# Altium footprint library Footprint-Lib-PhilsLab.PcbLib: 544 footprints (part 8 of 34)
Each footprint in its own frame and in the unit in brackets; x right, y up, seen from the top. Pads: shape width x height; smd on the part's side, far side on the other; paste and mask are expansions set on the pad; w line width, h text height; cw(c..) or ccw(c..) is an arc to the next point about the centre after c.
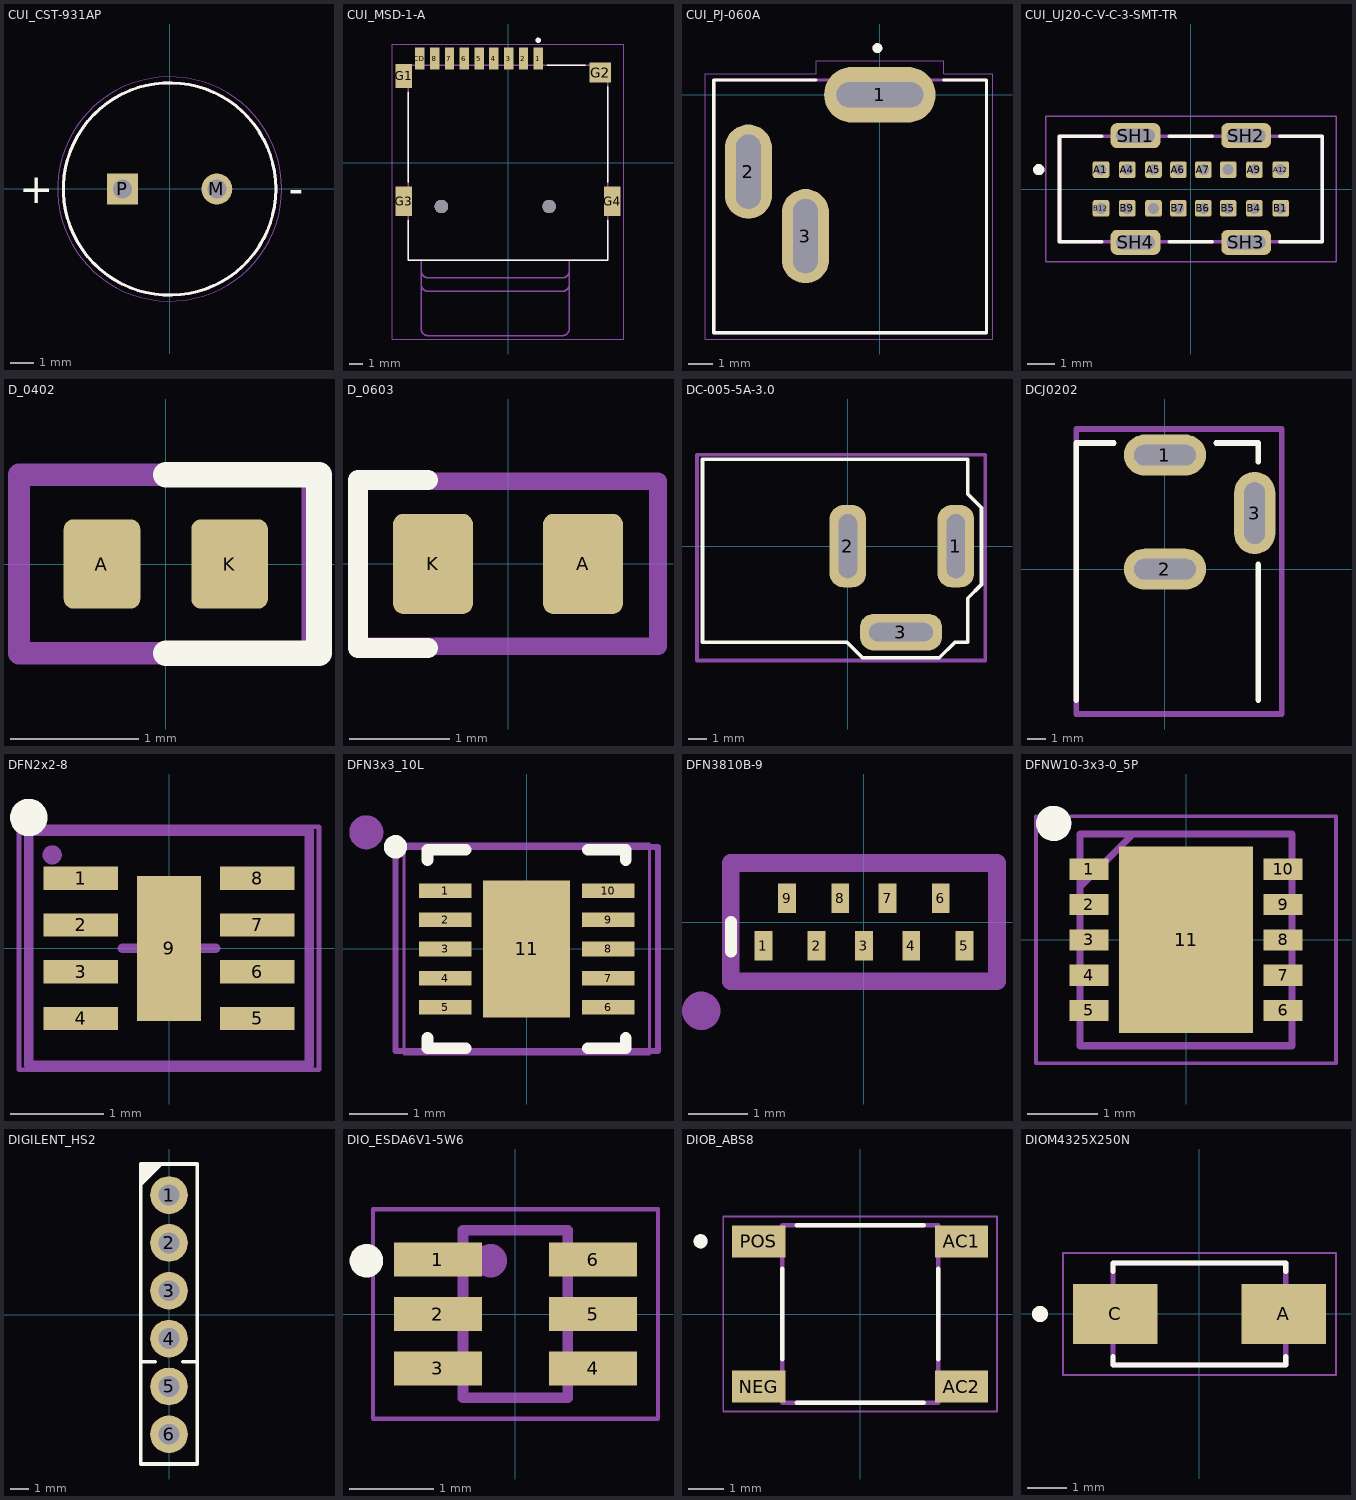
[diagram p7: the footprints below, top view; thin cyan lines are the x and y axes]

## CUI_CST-931AP [mm]
pads (2):
  round 1.308 hole 0.8: M(2,0)
  rect 1.308x1.308 hole 0.8: P(-2,0)
Top Overlay:
  circle w0.127: c0,0 r4.5
  text "+" at -6.381,-0.601 h1.27
  text "-" at 5.054,-0.601 h1.27
Mechanical 13:
  circle w0.127: c0,0 r4.5
Mechanical 15:
  circle w0.05: c0,0 r4.75
3D body "CUI_DEVICES_CMI-1295-0585T.step": height 9, standoff -6, extent -6.275,-5.85 5.725,6.15

## CUI_MSD-1-A [mm]
height 2
pads (15):
  rect 0.7x1.6 smd: 1(2.25,7.75) 2(1.15,7.75) 3(0.05,7.75) 4(-1.05,7.75) 5(-2.15,7.75) 6(-3.25,7.75) 7(-4.35,7.75) 8(-5.45,7.75) CD(-6.55,7.75)
  rect 1.2x1.8 smd: G1(-7.75,6.45)
  rect 1.6x1.5 smd: G2(6.85,6.7)
  rect 1.2x2.2 smd: G3(-7.75,-2.85) G4(7.75,-2.85)
  round 1 hole 1 unplated: ""(-4.95,-3.25) ""(3.05,-3.25)
Top Overlay:
  circle w0.2: c2.25,9.1 r0.1
  lines w0.127: -7.425,-4.27 -7.425,-7.25 7.425,-7.25 7.425,-4.27 ; -7.425,-1.43 -7.425,5.23 ; 2.92,7.25 5.73,7.25 ; 7.425,-1.43 7.425,5.63
Mechanical 13:
  circle w0.2: c2.25,9.1 r0.1
  lines w0.127: -6.45,-9.05 ccw(c-5.95,-9.05) -5.95,-9.55 4.05,-9.55 ccw(c4.05,-9.05) 4.55,-9.05 ; -6.45,-8.05 ccw(c-5.95,-8.05) -5.95,-8.55 4.05,-8.55 ccw(c4.05,-8.05) 4.55,-8.05 ; -6.45,-7.25 -6.45,-12.35 ccw(c-5.95,-12.35) -5.95,-12.85 4.05,-12.85 ccw(c4.05,-12.35) 4.55,-12.35 4.55,-7.25 ; -6.45,-7.25 4.55,-7.25 ; -6.45,-7.25 -7.425,-7.25 -7.425,7.25 7.425,7.25 7.425,-7.25 4.55,-7.25
Mechanical 15:
  lines w0.05: -8.6,-13.1 -8.6,8.8 8.6,8.8 8.6,-13.1 -8.6,-13.1
3D body "step_temp.STEP": height 1.8, standoff -0.6, extent -8.165,-7.24 7.985,7.81

## CUI_PJ-060A [mm]
height 14
pads (3):
  oval 4.5x2.25 hole 1 slot 3.5 at 0 deg: 1(0,0)
  oval 1.9x3.8 hole 1 slot 3 at 90 deg: 2(-5.3,-3.1) 3(-3,-5.7)
Top Overlay:
  circle w0.2: c-0.1,1.88 r0.1
  lines w0.127: -2.57,0.6 -6.7,0.6 -6.7,-9.6 4.3,-9.6 4.3,0.6 2.57,0.6
Mechanical 13:
  circle w0.2: c-0.1,1.88 r0.1
  lines w0.127: -6.7,-9.6 -6.7,0.6 4.3,0.6 4.3,-9.6 -6.7,-9.6
Mechanical 15:
  lines w0.05: -7.05,-9.85 -7.05,0.85 -2.57,0.85 -2.57,1.375 2.57,1.375 2.57,0.85 4.55,0.85 4.55,-9.85 -7.05,-9.85
3D body "step_temp.STEP": height 14.07, standoff -3.92, extent -6.643,-9.398 4.357,0.802

## CUI_UJ20-C-V-C-3-SMT-TR [mm]
height 10.75
pads (20):
  rrect25% 0.6x0.6 hole 0.4 square: A1(-3.25,0.7) A4(-2.3,0.7) A5(-1.35,0.7) A6(-0.45,0.7) A7(0.45,0.7) A9(2.3,0.7) A12(3.25,0.7) B1(3.25,-0.7) B4(2.3,-0.7) B5(1.35,-0.7) B6(0.45,-0.7) B7(-0.45,-0.7) B9(-2.3,-0.7) B12(-3.25,-0.7) MH33(1.35,0.7) MH42(-1.35,-0.7)
  rrect50% 1.8x0.9 hole 0.5 slot 1.4 at 0 deg: SH1(-2,1.93) SH2(2,1.93) SH3(2,-1.93) SH4(-2,-1.93)
Top Overlay:
  circle w0.2: c-5.5,0.7 r0.1
  lines w0.127: -3.22,-1.9 -4.75,-1.9 -4.75,1.9 -3.22,1.9 ; -0.78,-1.9 0.78,-1.9 ; -0.78,1.9 0.78,1.9 ; 3.22,-1.9 4.75,-1.9 4.75,1.9 3.22,1.9
Keep-Out Layer:
  board cut-out: -2.7,1.727 -2.7,1.73 -2.7,2.13 -2.7,2.133 -2.7,2.135 -2.699,2.138 -2.699,2.14 -2.698,2.143 -2.698,2.145 -2.697,2.148 -2.696,2.15 -2.695,2.153 -2.693,2.155 -2.692,2.157 -2.69,2.159 -2.689,2.161 -2.687,2.163 -2.685,2.165 -2.683,2.167 -2.681,2.169 -2.679,2.17 -2.677,2.172 -2.675,2.173 -2.673,2.175 -2.67,2.176 -2.668,2.177 -2.665,2.178 -2.663,2.178 -2.66,2.179 -2.658,2.179 -2.655,2.18 -2.653,2.18 -2.65,2.18 -1.35,2.18 -1.347,2.18 -1.345,2.18 -1.342,2.179 -1.34,2.179 -1.337,2.178 -1.335,2.178 -1.332,2.177 -1.33,2.176 -1.327,2.175 -1.325,2.173 -1.323,2.172 -1.321,2.17 -1.319,2.169 -1.317,2.167 -1.315,2.165 -1.313,2.163 -1.311,2.161 -1.31,2.159 -1.308,2.157 -1.307,2.155 -1.305,2.153 -1.304,2.15 -1.303,2.148 -1.302,2.145 -1.302,2.143 -1.301,2.14 -1.301,2.138 -1.3,2.135 -1.3,2.133 -1.3,2.13 -1.3,1.73 -1.3,1.727 -1.3,1.725 -1.301,1.722 -1.301,1.72 -1.302,1.717 -1.302,1.715 -1.303,1.712 -1.304,1.71 -1.305,1.707 -1.307,1.705 -1.308,1.703 -1.31,1.701 -1.311,1.699 -1.313,1.697 -1.315,1.695 -1.317,1.693 -1.319,1.691 -1.321,1.69 -1.323,1.688 -1.325,1.687 -1.327,1.685 -1.33,1.684 -1.332,1.683 -1.335,1.682 -1.337,1.682 -1.34,1.681 -1.342,1.681 -1.345,1.68 -1.347,1.68 -1.35,1.68 -2.65,1.68 -2.653,1.68 -2.655,1.68 -2.658,1.681 -2.66,1.681 -2.663,1.682 -2.665,1.682 -2.668,1.683 -2.67,1.684 -2.673,1.685 -2.675,1.687 -2.677,1.688 -2.679,1.69 -2.681,1.691 -2.683,1.693 -2.685,1.695 -2.687,1.697 -2.689,1.699 -2.69,1.701 -2.692,1.703 -2.693,1.705 -2.695,1.707 -2.696,1.71 -2.697,1.712 -2.698,1.715 -2.698,1.717 -2.699,1.72 -2.699,1.722 -2.7,1.725
Mechanical 13:
  circle w0.2: c-5.5,0.7 r0.1
  lines w0.127: -4.75,-1.9 4.75,-1.9 4.75,1.9 -4.75,1.9 -4.75,-1.9
Mechanical 15:
  lines w0.05: -5.25,-2.63 5.25,-2.63 5.25,2.63 -5.25,2.63 -5.25,-2.63
3D body "step_temp.STEP": height 10.5, standoff -2, extent -4.75,-2.08 4.75,2.08

## D_0402 [mm]
pads (2):
  rrect25% 0.6x0.7 smd: A(-0.5,0) K(0.5,0)
Top Overlay:
  lines w0.2: 0,-0.7 1.2,-0.7 1.2,0.7 0,0.7
Mechanical 13:
  lines w0.175: -1.15,-0.7 1.15,-0.7 1.15,0.7 -1.15,0.7 -1.15,-0.7
  text "'.Designator'" at -5.665,-0.417 h1
3D body "D0402.stp": height 0.51, standoff 0.01, extent -0.5,-0.25 0.5,0.25

## D_0603 [mm]
pads (2):
  rrect25% 0.8x1 smd: A(0.75,0) K(-0.75,0)
Top Overlay:
  lines w0.2: -0.8,-0.843 -1.5,-0.843 -1.5,0 -1.5,0.841 -0.8,0.841
Mechanical 13:
  lines w0.175: -1.5,-0.825 1.5,-0.825 1.5,0.825 -1.5,0.825 -1.5,-0.825
  text "'.Designator'" at -5.665,-0.417 h1
3D body "D_TVS_0603.stp": height 0.81, standoff 0.01, extent -0.8,-0.45 0.8,0.45

## DC-005-5A-3.0 [mm]
pads (3):
  rrect75% 2x4.5 hole 1 slot 3.5 at 90 deg mask+0.07: 1(5.9,0) 2(0,0)
  rrect75% 4.5x2 hole 1 slot 3.5 at 0 deg mask+0.07: 3(2.9,-4.7)
Top Overlay:
  lines w0.2: -7.95,-5.25 -0.05,-5.25 0.8,-6.1 5,-6.1 5.85,-5.25 6.55,-5.25 6.55,-2.85 7.3,-2.1 7.3,2.1 6.55,2.85 6.55,4.75 -7.95,4.75 -7.95,-5.25
Mechanical 13:
  lines w0.2: -8.25,-6.25 -8.25,5 7.5,5 7.5,-6.25 -8.25,-6.25
  text "'.Designator'" at -7.231,-1.087 h1.25
3D body "dc-005-5a-3_0.stp": height 11.01, standoff -3.59, extent -7.7,-4.9 6.3,4.5

## DCJ0202 [mm]
pads (3):
  oval 4.4x2.2 hole 1.1 slot 3.3 at 0 deg: 1(0,6.1) 2(0,0)
  oval 2.2x4.4 hole 1.1 slot 3.3 at 90 deg: 3(4.8,3)
Top Overlay:
  lines w0.3: -4.75,-7 -4.75,6.75 -2.75,6.75 ; 2.75,6.75 5,6.75 5,5.75 ; 5,-7 5,0.25
Mechanical 13:
  lines w0.3: -4.75,-7.75 6.25,-7.75 6.25,7.5 -4.75,7.5 -4.75,-7.75
  text "'.Designator'" at -5.665,-0.417 h1
3D body "DCJ0202.step": height 11.01, standoff -3.49, extent -4.518,-7.481 4.837,6.519

## DFN2x2-8 [mm]
height 0.65
pads (9):
  rect 0.8x0.25 smd mask+0.15: 1(-0.945,0.75) 2(-0.945,0.25) 3(-0.945,-0.25) 4(-0.945,-0.75) 5(0.945,-0.75) 6(0.945,-0.25) 7(0.945,0.25) 8(0.945,0.75)
  rect 0.69x1.55 smd: 9(0,0)
Top Overlay:
  circle w0.2: c-1.5,1.4 r0.1
Mechanical 13:
  circle w0.1: c-1.25,1 r0.053
  lines w0.1: -1.5,-1.25 1.5,-1.25 1.5,1.25 -1.5,1.25 -1.5,-1.25
  text "'.Designator'" at -5.815,-0.9 h1
Mechanical 15:
  lines w0.05: -1.605,-1.3 1.605,-1.3 1.605,1.3 -1.605,1.3 -1.605,-1.3
  lines w0.1: -0.5,0 0.5,0 ; 0,-0.5 0,0.5
3D body "DFN2x2-8.step": height 0.65, standoff 0, extent -1.051,-1.05 1.051,1.05

## DFN3x3_10L [mm]
height 0.8
pads (11):
  rect 0.9x0.25 smd mask+0.15: 1(-1.395,1) 2(-1.395,0.5) 3(-1.395,0) 4(-1.395,-0.5) 5(-1.395,-1) 6(1.395,-1) 7(1.395,-0.5) 8(1.395,0) 9(1.395,0.5) 10(1.395,1)
  rect 1.49x2.35 smd: 11(0,0)
Top Overlay:
  circle w0.3: c-2.25,1.75 r0.05
  lines w0.2: -1.7,-1.525 -1.7,-1.7 -1.045,-1.7 ; -1.7,1.525 -1.7,1.7 -1.045,1.7 ; 1.045,-1.7 1.7,-1.7 1.7,-1.525 ; 1.045,1.7 1.7,1.7 1.7,1.525
Mechanical 13:
  circle w0.3: c-2.75,2 r0.141
  lines w0.1: -2.25,-1.75 -2.25,1.75 2.25,1.75 2.25,-1.75 -2.25,-1.75
  text "'.Designator'" at -5.665,-0.417 h1
Mechanical 15:
  lines w0.05: -2.105,-1.8 -2.105,1.8 2.105,1.8 2.105,-1.8 -2.105,-1.8
  lines w0.1: -0.5,0 0.5,0 ; 0,-0.5 0,0.5
3D body "DFN3x3_10L.step": height 0.8, standoff 0, extent -1.551,-1.55 1.551,1.55

## DFN3810B-9 [mm]
pads (9):
  rect 0.3x0.5 smd: 1(-1.7,-0.4) 2(-0.8,-0.4) 3(0,-0.4) 4(0.8,-0.4) 5(1.7,-0.4) 6(1.3,0.4) 7(0.4,0.4) 8(-0.4,0.4) 9(-1.3,0.4)
Top Overlay:
  lines w0.2: -2.25,-0.5 -2.25,0
Mechanical 13:
  circle w0.5: c-2.75,-1.5 r0.073
  lines w0.3: -2.25,-1 2.25,-1 2.25,1 -2.25,1 -2.25,-1
  text "'.Designator'" at -5.815,-0.9 h1
3D body "DFN3810B-9.stp": height 0.5, standoff 0, extent -1.9,-0.5 1.9,0.5

## DFNW10-3x3-0_5P [mm]
pads (11):
  rect 0.55x0.3 smd mask+0.15: 1(-1.375,1) 2(-1.375,0.5) 3(-1.375,0) 4(-1.375,-0.5) 5(-1.375,-1) 6(1.375,-1) 7(1.375,-0.5) 8(1.375,0) 9(1.375,0.5) 10(1.375,1)
  rect 1.9x2.64 smd: 11(0,0)
Top Overlay:
  circle w0.25: c-1.875,1.65 r0.125
Mechanical 13:
  lines w0.1: -1.5,0.75 -0.75,1.5 ; -1.5,-1.5 1.5,-1.5 1.5,1.5 -1.5,1.5 -1.5,-1.5
  text "'.Designator'" at -5.815,-0.9 h1
Mechanical 15:
  lines w0.05: -2.125,-1.75 2.125,-1.75 2.125,1.75 -2.125,1.75 -2.125,-1.75
3D body "NCP51200MNTXG.stp": height 1, standoff 0, extent -1.55,-1.5 1.55,1.5

## DIGILENT_HS2 [mm]
pads (6):
  round 2 hole 1.1: 1(0,6.35) 2(0,3.81) 3(0,1.27) 4(0,-1.27) 5(0,-3.81) 6(0,-6.35)
Top Overlay:
  region: -1.5,6.797 -0.297,8 -1.5,8
  lines w0.2: -1.5,-2.5 -0.75,-2.5 ; 0.75,-2.5 1.5,-2.5 ; -1.5,-7.927 1.5,-7.927 1.5,8 -1.5,8 -1.5,-7.927
3D body "68000-x06.stp": height 8.39, standoff -2.4, extent -1.2,-7.62 1.213,7.62

## DIO_ESDA6V1-5W6 [mm]
pads (6):
  rect 1.05x0.4 smd: 1(-0.925,0.65) 2(-0.925,0) 3(-0.925,-0.65) 4(0.925,-0.65) 5(0.925,0) 6(0.925,0.65)
Top Overlay:
  circle w0.2: c-1.778,0.635 r0.1
Mechanical 13:
  circle w0.2: c-0.3,0.635 r0.1
  lines w0.127: -0.625,-1 -0.625,1 0.625,1 0.625,-1 -0.625,-1
Mechanical 15:
  lines w0.05: -1.7,-1.25 -1.7,1.25 1.7,1.25 1.7,-1.25 -1.7,-1.25
3D body "step_temp.STEP": height 1.1, standoff 0, extent -1.05,-1 1.05,1

## DIOB_ABS8 [mm]
pads (4):
  rect 1.5x0.9 smd: AC1(2.86,2.05) AC2(2.86,-2.05) NEG(-2.86,-2.05) POS(-2.86,2.05)
Top Overlay:
  circle w0.2: c-4.5,2.05 r0.1
  lines w0.127: -2.2,-1.28 -2.2,1.28 ; -1.79,-2.5 1.79,-2.5 ; -1.79,2.5 1.79,2.5 ; 2.2,-1.28 2.2,1.28
Mechanical 13:
  circle w0.2: c-4.5,2.05 r0.1
  lines w0.127: -2.2,-2.5 -2.2,2.5 2.2,2.5 2.2,-2.5 -2.2,-2.5
Mechanical 15:
  lines w0.05: -3.86,-2.75 -3.86,2.75 3.86,2.75 3.86,-2.75 -3.86,-2.75
3D body "step_temp.STEP": height 1.6, standoff 0, extent -3.225,-2.5 3.225,2.5

## DIOM4325X250N [mm]
height 2.5
pads (2):
  rect 2.12x1.5 smd: A(2.115,0) C(-2.115,0)
Top Overlay:
  circle w0.2: c-4,0 r0.1
  lines w0.127: -2.165,-1.07 -2.165,-1.28 2.165,-1.28 2.165,-1.07 ; -2.165,1.07 -2.165,1.28 2.165,1.28 2.165,1.07
Mechanical 13:
  circle w0.2: c-4,0 r0.1
  lines w0.127: -2.165,-1.28 -2.165,1.28 2.165,1.28 2.165,-1.28 -2.165,-1.28
Mechanical 15:
  lines w0.05: -3.425,-1.53 -3.425,1.53 3.425,1.53 3.425,-1.53 -3.425,-1.53
3D body "step_temp.STEP": height 2.4, standoff 0, extent -2.598,-1.302 2.598,1.302